# Altium footprint library arduino_mega_footprint.PcbLib: 3 footprints
Each footprint in its own frame and in the unit in brackets; x right, y up, seen from the top. Pads: shape width x height; smd on the part's side, far side on the other; paste and mask are expansions set on the pad; w line width, h text height; cw(c..) or ccw(c..) is an arc to the next point about the centre after c.
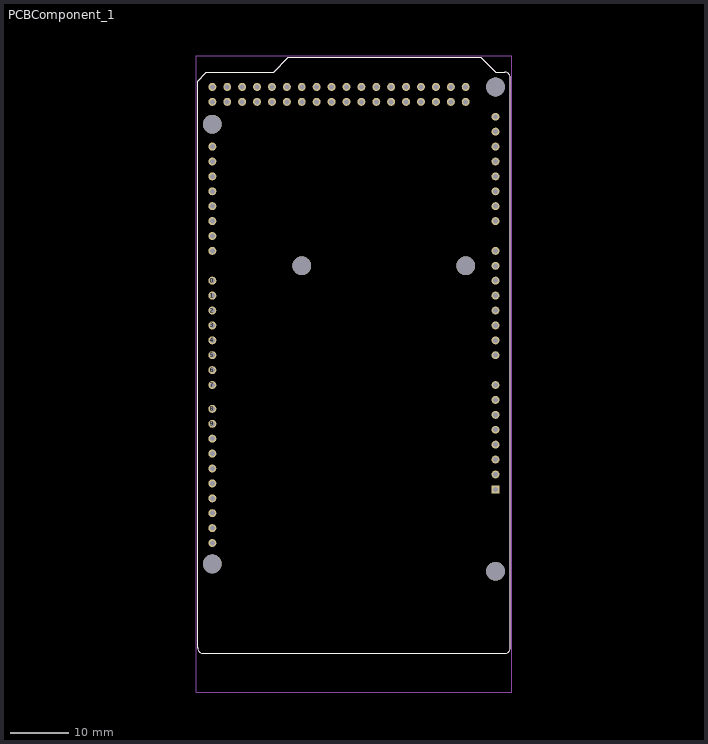
[diagram p0: the footprints below, top view; thin cyan lines are the x and y axes]

## PCBComponent_1 [mm]
pads (92):
  round 1.358 hole 0.85: 0(-182.245,-120.269) 1(-182.245,-122.809) 2(-182.245,-125.349) 3(-182.245,-127.889) 3V3(-133.985,-148.209) 4(-182.245,-130.429) 5(-182.245,-132.969) 5V_1(-133.985,-145.669) 5V_2(-182.245,-89.789) 5V_3(-182.245,-87.249) 6(-182.245,-135.509) 7(-182.245,-138.049) 8(-182.245,-142.113) 9(-182.245,-144.653) 10(-182.245,-147.193) 11(-182.245,-149.733) 12(-182.245,-152.273) 13(-182.245,-154.813) 14(-182.245,-115.189) 15(-182.245,-112.649) 16(-182.245,-110.109) 17(-182.245,-107.569) 18(-182.245,-105.029) 19(-182.245,-102.489) 20(-182.245,-99.949) 21(-182.245,-97.409) 22(-179.705,-89.789) 23(-179.705,-87.249) 24(-177.165,-89.789) 25(-177.165,-87.249) 26(-174.625,-89.789) 27(-174.625,-87.249) 28(-172.085,-89.789) 29(-172.085,-87.249) 30(-169.545,-89.789) 31(-169.545,-87.249) 32(-167.005,-89.789) 33(-167.005,-87.249) 34(-164.465,-89.789) 35(-164.465,-87.249) 36(-161.925,-89.789) 37(-161.925,-87.249) 38(-159.385,-89.789) 39(-159.385,-87.249) 40(-156.845,-89.789) 41(-156.845,-87.249) 42(-154.305,-89.789) 43(-154.305,-87.249) 44(-151.765,-89.789) 45(-151.765,-87.249) 46(-149.225,-89.789) 47(-149.225,-87.249) 48(-146.685,-89.789) 49(-146.685,-87.249) 50(-144.145,-89.789) 51(-144.145,-87.249) 52(-141.605,-89.789) 53(-141.605,-87.249) AD0(-133.985,-132.969) AD1(-133.985,-130.429) AD2(-133.985,-127.889) AD3(-133.985,-125.349) AD4(-133.985,-122.809) AD5(-133.985,-120.269) AD6(-133.985,-117.729) AD7(-133.985,-115.189) AD8(-133.985,-110.109) AD9(-133.985,-107.569) AD10(-133.985,-105.029) AD11(-133.985,-102.489) AD12(-133.985,-99.949) AD13(-133.985,-97.409) AD14(-133.985,-94.869) AD15(-133.985,-92.329) AREF(-182.245,-159.893) GND1(-133.985,-143.129) GND2(-133.985,-140.589) GND3(-182.245,-157.353) GND4(-139.065,-89.789) GND5(-139.065,-87.249) IOREF(-133.985,-153.289) RESET(-133.985,-150.749) SCL(-182.245,-164.973) SDA(-182.245,-162.433) VIN(-133.985,-138.049)
  rect 1.358x1.358 / inner round 1.358 / far side rect 1.358x1.358 hole 0.85: NC(-133.985,-155.829)
  round 3.2 hole 3.2 unplated: ""(-182.245,-168.529) ""(-182.245,-93.599) ""(-167.005,-117.729) ""(-139.065,-117.729) ""(-133.985,-169.799) ""(-133.985,-87.249)
Top Overlay:
  lines w0.127: -184.772,-182.795 ccw(c-183.772,-182.795) -183.772,-183.795 -132.432,-183.795 ccw(c-132.432,-182.795) -131.432,-182.795 -131.432,-85.735 ccw(c-132.432,-85.735) -132.432,-84.735 -133.972,-84.735 -136.512,-82.195 -169.278,-82.195 -171.818,-84.735 -183.248,-84.735 -184.772,-86.259 -184.772,-182.795
Mechanical 13:
  lines w0.127: -184.772,-182.795 ccw(c-183.772,-182.795) -183.772,-183.795 -132.432,-183.795 ccw(c-132.432,-182.795) -131.432,-182.795 -131.432,-85.735 ccw(c-132.432,-85.735) -132.432,-84.735 -133.972,-84.735 -136.512,-82.195 -169.278,-82.195 -171.818,-84.735 -183.248,-84.735 -184.772,-86.259 -184.772,-182.795
Mechanical 15:
  lines w0.05: -185.022,-190.395 -131.182,-190.395 -131.182,-81.945 -185.022,-81.945 -185.022,-190.395
3D body "step_temp.STEP": height 3, standoff -13.23, extent -184.602,-189.995 -131.602,-81.995

## PCBComponent_1 - duplicate [mil]

## PCBComponent_1 - duplicate1 [mil]